# EAGLE library part ARDUINO-CONNECTORS_SIM (library HA_FONA_LARA_20)
SIM connector
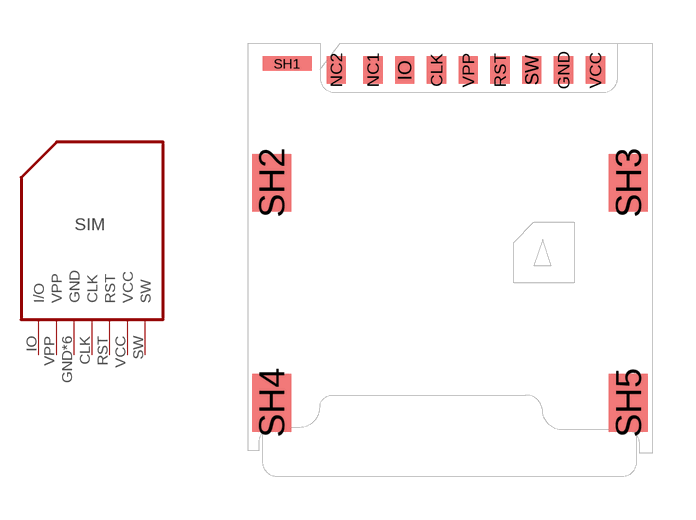
[diagram p1: symbol with the pads of ARDUINO-CONNECTORS_MICROSIM8; footprint ARDUINO-CONNECTORS_MICROSIM8]

Designator prefix SIM

## ARDUINO-CONNECTORS_SIM (CODE-BCE: -; CODE-TK2: -; DATASHEET: http://www.te.com/commerce/DocumentDelivery/DDEController?Action=srchrtrv&DocNm=2199337&DocType=Customer+Drawing&DocLang=English; DISTRIBUTOR-LINK: https://www.digikey.com/product-detail/en/te-connectivity-amp-connectors/2199337-5/A125065CT-ND/6810766; DISTRIBUTOR-PN: A125065CT-ND; MANUFACTURER: TE; MANUFACTURER-PN: 2199337-5; VALUE: -)  [ARDUINO-CONNECTORS_MICROSIM8]
CLK  CLK
GND  GND
IO  I/O
RST  RST
SH1  GND
SH2  GND
SH3  GND
SH4  GND
SH5  GND
SW  SW
VCC  VCC
VPP  VPP

## Footprint ARDUINO-CONNECTORS_MICROSIM8 (pad centres in mm)
smd 0.67 x 0.95: CLK -0.47,6.77; GND 3.93,6.77; IO -1.57,6.77; NC1 -2.67,6.77; NC2 -3.94,6.77; RST 1.73,6.77; SW 2.83,6.77; VCC 5.03,6.77; VPP 0.63,6.77
smd 1.7 x 0.5: SH1 -5.64,6.995
smd 1.35 x 2: SH2 -6.175,2.865; SH3 6.175,2.865; SH4 -6.175,-4.755; SH5 6.175,-4.755